# Altium schematic symbol library MY_LIB_Special.SchLib: 2 symbols
Pins are listed as number, name and electrical type; pins without a type are passive.

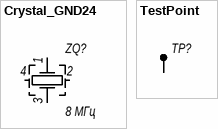
[diagram p0: symbols Crystal_GND24 to TestPoint]

## Crystal_GND24
designator ZQ?, comment 8 МГц
Four-pin quartz crystal resonator with ground terminals 2 and 4
pins: 1 XTAL1, 2 GND, 3 XTAL2, 4 GND

## TestPoint
designator TP?  (value not drawn)  (no BOM)
Test point indicator; GOST 2.721-74, Table 6a, item 7; filled dot with downward lead; Standard: GOST 2.721-74, Table 6a, item 7
pins: 1 TP